# Altium schematic symbol library Schlib1.SchLib: 72 symbols (part 3 of 3)
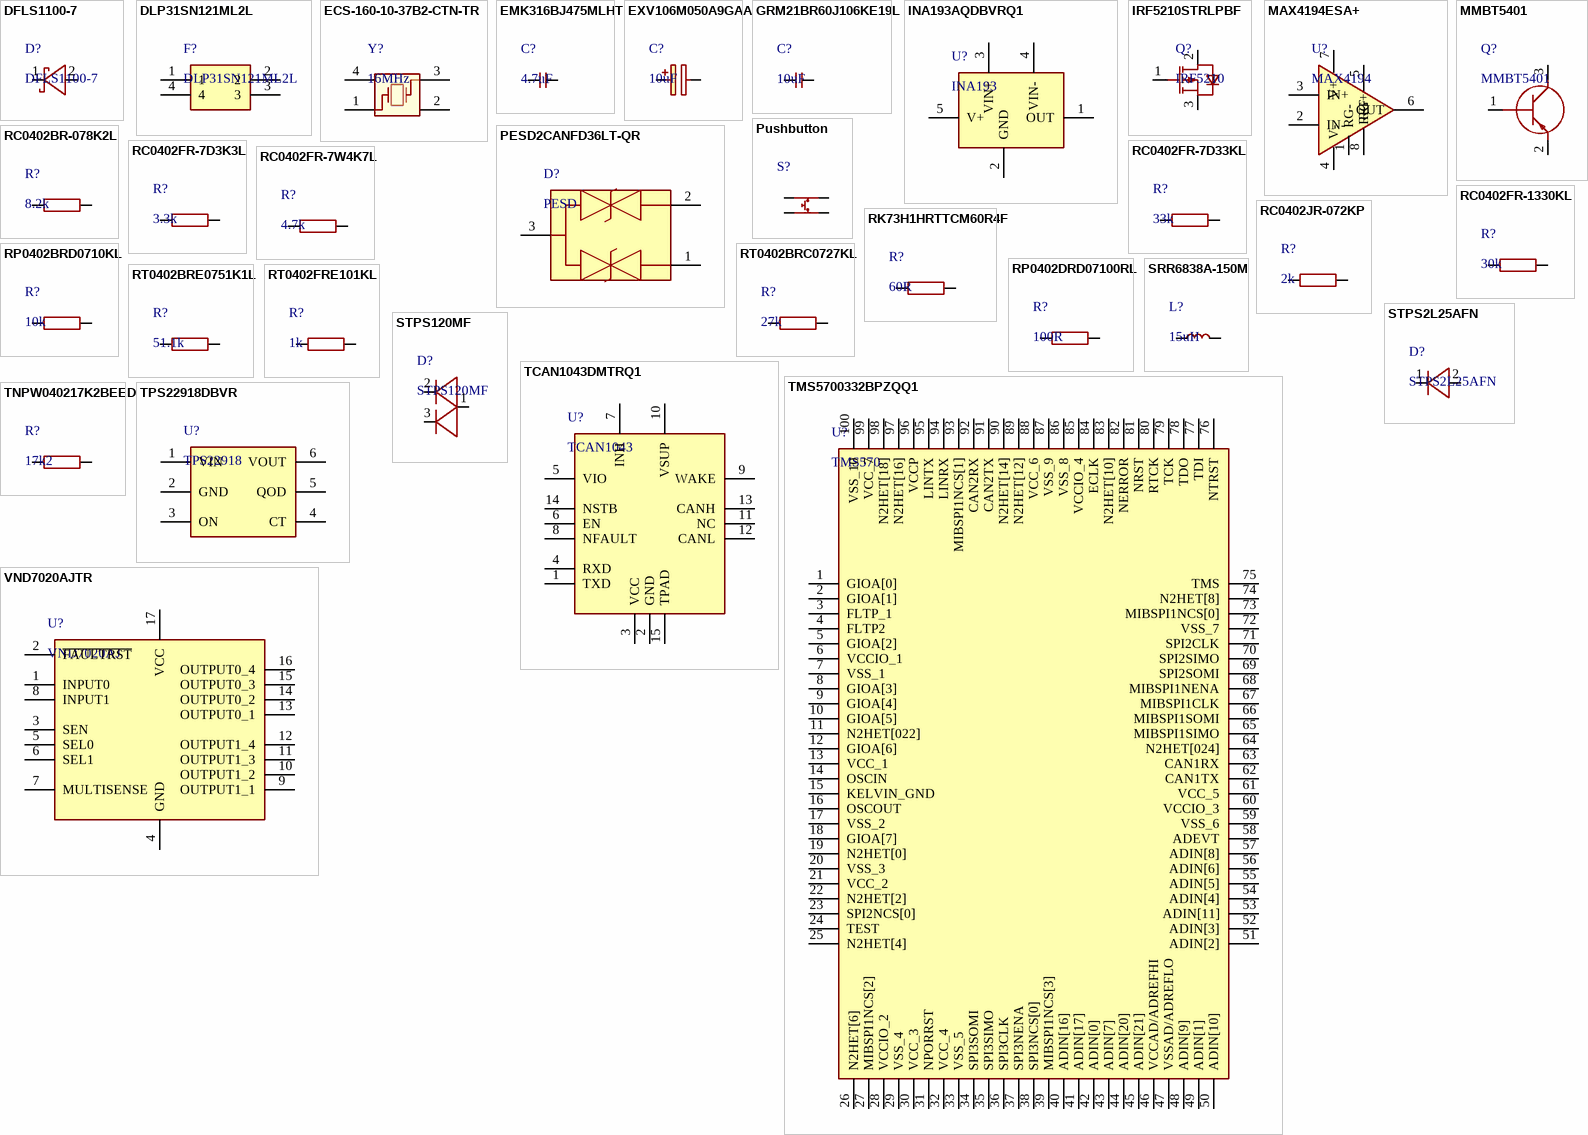
[diagram p3: symbols DFLS1100-7 to VND7020AJTR]

## TPS22918DBVR
designator U?, comment TPS22918
Power Supply Support Circuit, Fixed, 1 Channel, PDSO6; Manufacturer: Texas Instruments; Manufacturer Part Number: TPS22918DBVR; Package Body Material: Plastic; Adjustable Threshold: No; Number of Channels: 1; Package Equivalence Code: TSOP6,.11,37; Max Supply Voltage: 5.5V; Min Supply Voltage: 0V; Nominal Supply Voltage: 1V; Supplier: Mouser; Supplier Part Number: 595-TPS22918DBVR; RoHS: Yes; Category: Power Management ICs; Stock: 33614; Pricing: 1=0.41, 10=0.285, 50=0.254, 100=0.22, 1000=0.186, 10000=0.185 (USD); Case/Package: LSSOP; Pins: 6; Terminal Finish: Tin; Package Shape: Rectangular; Min Operating Temperature: -40°C; Max Operating Temperature: 105°C; JESD-609 Code: e3; Moisture Sensitivity Level: 2; Throw Configuration: POWER SUPPLY SUPPORT CIRCUIT; JESD-30 Code: R-PDSO-G6; Channels: 1; Package Style: SMALL OUTLINE, LOW PROFILE, SHRINK PITCHMeter; Surface Mount: Yes; Terminal Form: Gull Wing; Terminal Position: DUAL; Length: 2.9mm; Width: 1.6mm; Height - Seated (Max): 1.45mm; Terminal Pitch: 0.95mm; Reach SVHC Compliant: Yes; RoHS Compliant: Yes; Temperature Grade: INDUSTRIAL; ComponentLink1URL: https://www.ti.com:443/lit/ds/symlink/tps22918.pdf?src-supplier=IHS+Markit; ComponentLink1Description: https://www.ti.com:443/lit/ds/symlink/tps22918.pdf?src-supplier=IHS+Markit; ComponentLink2URL: http://www.ti.com/lit/gpn/tps22918?src-supplier=Mouser; ComponentLink2Description: http://www.ti.com/lit/gpn/tps22918?src-supplier=Mouser; ComponentLink3URL: http://www.ti.com/lit/ds/symlink/tps22918.pdf?src-supplier=Digikey; ComponentLink3Description: http://www.ti.com/lit/ds/symlink/tps22918.pdf?src-supplier=Digikey; ComponentLink4URL: http://www.ti.com/general/docs/suppproductinfo.tsp?distId=10&amp;gotoUrl=http%3A%2F%2Fwww.ti.com%2Flit%2Fgpn%2Ftps22918&src-supplier=Digikey; ComponentLink4Description: http://www.ti.com/general/docs/suppproductinfo.tsp?distId=10&amp;gotoUrl=http%3A%2F%2Fwww.ti.com%2Flit%2Fgpn%2Ftps22918&src-supplier=Digikey
footprint SOT95P280X145-6N
pins: 1 VIN, 2 GND, 3 ON, 4 CT, 5 QOD, 6 VOUT

## VND7020AJTR
designator U?, comment VND7020AJ
Buffer/Inverter Based Peripheral Driver, PDSO16; Manufacturer: STMicroelectronics; Manufacturer Part Number: VND7020AJTR; Package Body Material: Plastic; Built-in Protections: Over Current,Over Voltage,Under Voltage,TRANSIENT,THERMAL; Interface IC Type: BUFFER OR INVERTER BASED PERIPHERAL DRIVER; Channels: 1; Output Current Flow Direction: SINK; Max Supply Voltage: 28V; Min Supply Voltage: 4V; Nominal Supply Voltage: 13V; Turn-Off Delay Time: 100us; Turn-On Delay Time: 120us; Supplier: Mouser; Supplier Part Number: 511-VND7020AJTR; RoHS: Yes; Category: Power Management ICs; Stock: 132353; Pricing: 1=2.79, 10=2.05, 50=1.93, 100=1.77, 1000=1.53, 10000=1.41 (USD); Case/Package: HLSSOP; Pins: 16; Package Shape: Rectangular; Min Operating Temperature: -40°C; Max Operating Temperature: 125°C; JESD-30 Code: R-PDSO-G16; Package Style: SMALL OUTLINE, HEAT SINK/SLUG, LOW PROFILE, SHRINK PITCHMeter; Surface Mount: Yes; Terminal Form: Gull Wing; Terminal Position: DUAL; Length: 4.9mm; Width: 3.9mm; Height - Seated (Max): 1.7mm; Terminal Pitch: 0.5mm; Reach SVHC Compliant: Yes; RoHS Compliant: Yes; Temperature Grade: AUTOMOTIVE; ComponentLink1URL: https://datasheet.ciiva.com:443/pdfs/VipMasterIC/IC/SGST/SGST-S-A0003587758/SGST-S-A0003587758-1.pdf?src-supplier=IHS+Markit; ComponentLink1Description: https://datasheet.ciiva.com:443/pdfs/VipMasterIC/IC/SGST/SGST-S-A0003587758/SGST-S-A0003587758-1.pdf?src-supplier=IHS+Markit; ComponentLink2URL: http://www.st.com/content/ccc/resource/technical/document/datasheet/53/f9/e8/69/7d/b8/4a/10/DM00157075.pdf/files/DM00157075.pdf/jcr:content/translations/en.DM00157075.pdf?src-supplier=Digikey; ComponentLink2Description: http://www.st.com/content/ccc/resource/technical/document/datasheet/53/f9/e8/69/7d/b8/4a/10/DM00157075.pdf/files/DM00157075.pdf/jcr:content/translations/en.DM00157075.pdf?src-supplier=Digikey; ComponentLink3URL: http://www.st.com/st-web-ui/static/active/en/resource/technical/document/datasheet/DM00157075.pdf?src-supplier=Avnet; ComponentLink3Description: http://www.st.com/st-web-ui/static/active/en/resource/technical/document/datasheet/DM00157075.pdf?src-supplier=Avnet; ComponentLink4URL: https://datasheet.octopart.com/VND7020AJTR-STMicroelectronics-datasheet-42731139.pdf?src-supplier=Future+Electronics; ComponentLink4Description: https://datasheet.octopart.com/VND7020AJTR-STMicroelectronics-datasheet-42731139.pdf?src-supplier=Future+Electronics; ComponentLink5URL: https://datasheet.octopart.com/VND7020AJTR-STMicroelectronics-datasheet-158447462.pdf?src-supplier=SHENGYU+ELECTRONICS; ComponentLink5Description: https://datasheet.octopart.com/VND7020AJTR-STMicroelectronics-datasheet-158447462.pdf?src-supplier=SHENGYU+ELECTRONICS; ComponentLink6URL: https://datasheet.octopart.com/VND7020AJTR-STMicroelectronics-datasheet-140368810.pdf?src-supplier=TME; ComponentLink6Description: https://datasheet.octopart.com/VND7020AJTR-STMicroelectronics-datasheet-140368810.pdf?src-supplier=TME
footprint SOP50P600X170-17N
pins: 1 INPUT0, 2 ~{FAULTRST}, 3 SEN, 4 GND, 5 SEL0, 6 SEL1, 7 MULTISENSE, 8 INPUT1, 9 OUTPUT1_1, 10 OUTPUT1_2, 11 OUTPUT1_3, 12 OUTPUT1_4, 13 OUTPUT0_1, 14 OUTPUT0_2, 15 OUTPUT0_3, 16 OUTPUT0_4, 17 VCC